# Altium footprint library Seeed_Studio_XIAO_Series_Footprints.PcbLib: 34 footprints (part 1 of 3)
Each footprint in its own frame and in the unit in brackets; x right, y up, seen from the top. Pads: shape width x height; smd on the part's side, far side on the other; paste and mask are expansions set on the pad; w line width, h text height; cw(c..) or ccw(c..) is an arc to the next point about the centre after c.
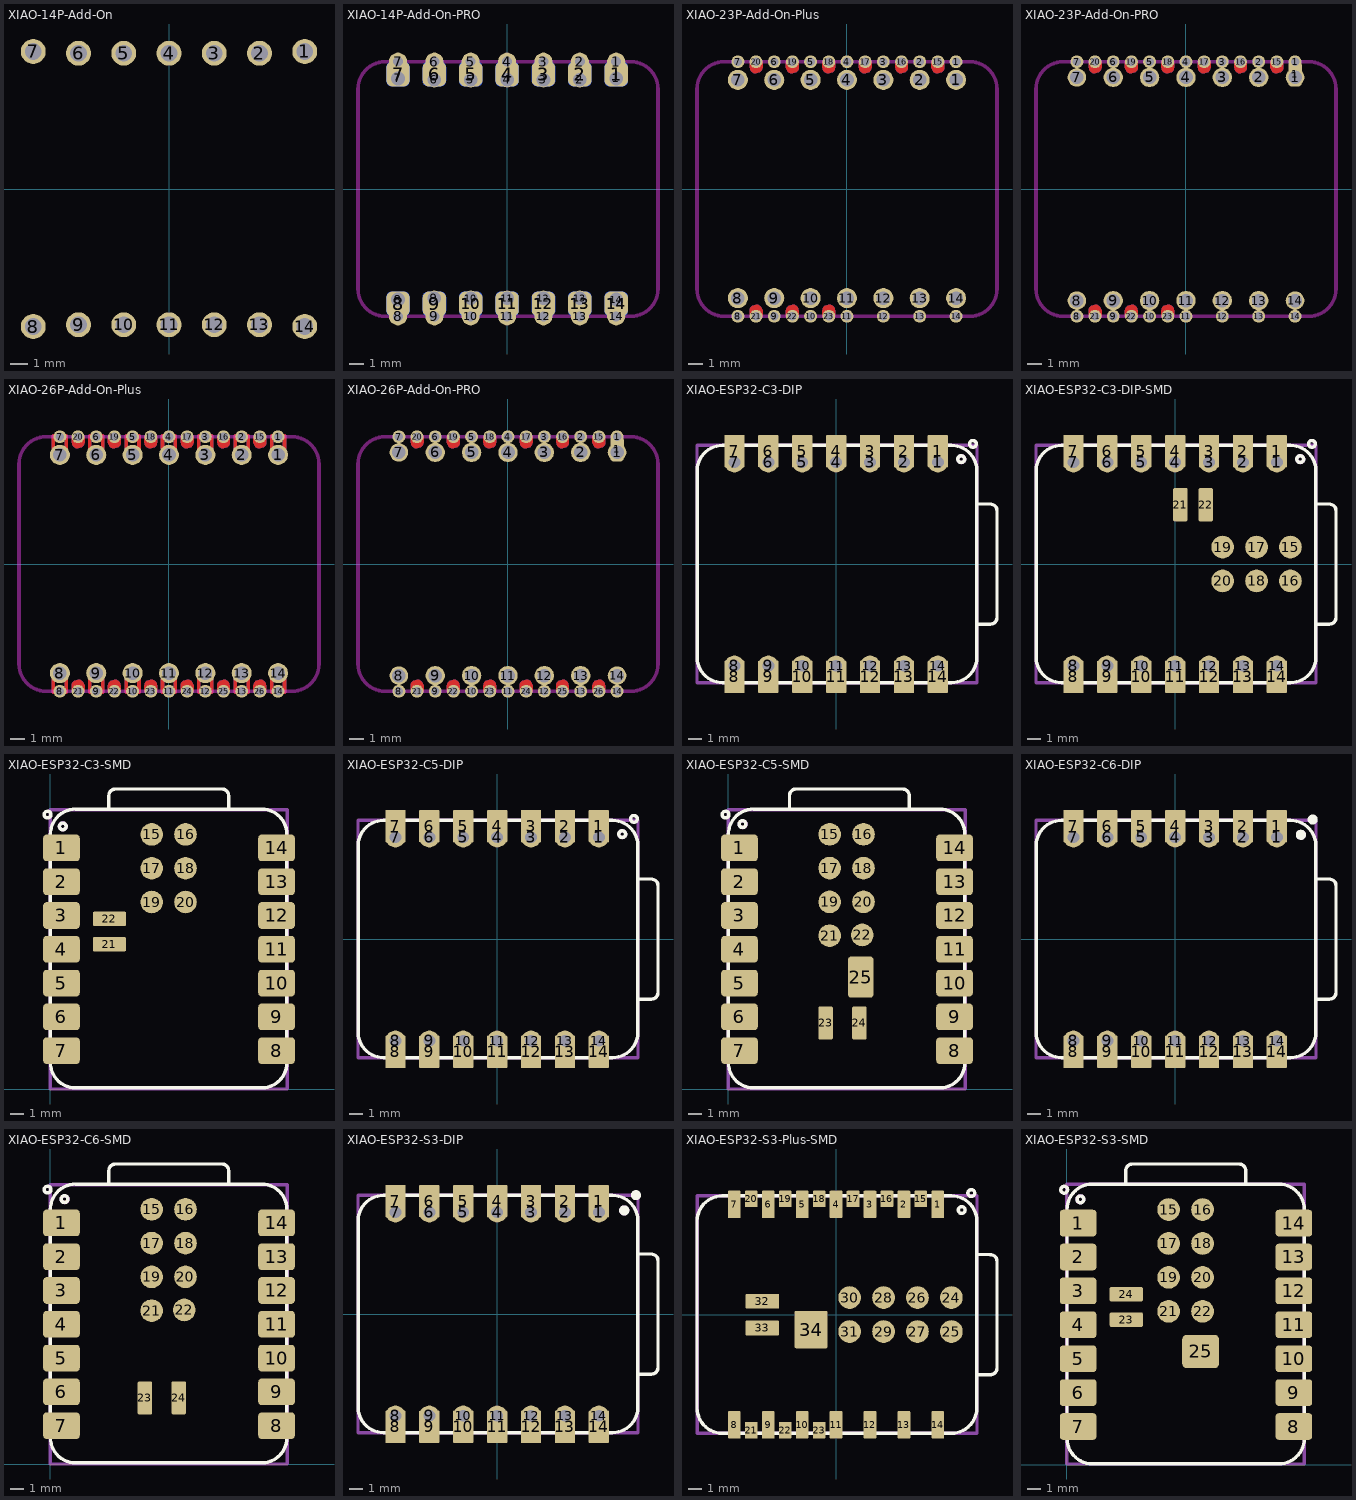
[diagram p0: the footprints below, top view; thin cyan lines are the x and y axes]

## XIAO-14P-Add-On [mm]
pads (14):
  round 1.4 hole 0.95: 1(7.62,7.72) 2(5.08,7.62) 3(2.54,7.62) 4(0,7.62) 5(-2.54,7.62) 6(-5.08,7.62) 7(-7.62,7.72) 8(-7.62,-7.72) 9(-5.08,-7.62) 10(-2.54,-7.62) 11(0,-7.62) 12(2.54,-7.62) 13(5.08,-7.62) 14(7.62,-7.72)
3D body "Seeeduino XIAO SAMD21 v4.step": height 4.5, standoff -0.01, extent -10.65,-9.077 11.95,8.823

## XIAO-14P-Add-On-PRO [mm]
pads (56):
  round 1.05 hole 0.95: 1(7.62,7.72) 2(5.08,7.62) 3(2.54,7.62) 4(0,7.62) 5(-2.54,7.62) 6(-5.08,7.62) 7(-7.62,7.72) 8(-7.62,-7.72) 9(-5.08,-7.62) 10(-2.54,-7.62) 11(0,-7.62) 12(2.54,-7.62) 13(5.08,-7.62) 14(7.62,-7.72)
  rrect50% 1.626x1.725 smd: 1(7.62,8.028) 2(5.08,8.028) 3(2.54,8.028) 4(0,8.028) 5(-2.54,8.028) 6(-5.08,8.028) 7(-7.62,8.028) 8(-7.62,-8.028) 9(-5.08,-8.028) 10(-2.54,-8.028) 11(0,-8.028) 12(2.54,-8.028) 13(5.08,-8.028) 14(7.62,-8.028)
  rrect50% 1.626x1.725 smd far side: 1(7.62,8.028) 2(5.08,8.028) 3(2.54,8.028) 4(0,8.028) 5(-2.54,8.028) 6(-5.08,8.028) 7(-7.62,8.028) 8(-7.62,-8.028) 9(-5.08,-8.028) 10(-2.54,-8.028) 11(0,-8.028) 12(2.54,-8.028) 13(5.08,-8.028) 14(7.62,-8.028)
  round 1.27 hole 0.7: 1(7.62,8.89) 2(5.08,8.89) 3(2.54,8.89) 4(0,8.89) 5(-2.54,8.89) 6(-5.08,8.89) 7(-7.62,8.89) 8(-7.62,-8.89) 9(-5.08,-8.89) 10(-2.54,-8.89) 11(0,-8.89) 12(2.54,-8.89) 13(5.08,-8.89) 14(7.62,-8.89)
Edge.Cuts:
  lines w0.254: -10.414,-6.985 ccw(c-8.509,-6.985) -8.509,-8.89 8.636,-8.89 ccw(c8.636,-6.985) 10.541,-6.985 10.541,6.985 ccw(c8.636,6.985) 8.636,8.89 -8.509,8.89 ccw(c-8.509,6.985) -10.414,6.985 -10.414,-6.985

## XIAO-23P-Add-On-Plus [mm]
pads (37):
  round 1.4 hole 0.95: 1(7.62,7.62) 2(5.08,7.62) 3(2.54,7.62) 4(0,7.62) 5(-2.54,7.62) 6(-5.08,7.62) 7(-7.62,7.62) 8(-7.62,-7.62) 9(-5.08,-7.62) 10(-2.54,-7.62) 11(0,-7.62) 12(2.54,-7.62) 13(5.08,-7.62) 14(7.62,-7.62)
  round 0.9 hole 0.6: 1(7.62,8.89) 2(5.08,8.89) 3(2.54,8.89) 4(0,8.89) 5(-2.54,8.89) 6(-5.08,8.89) 7(-7.62,8.89) 8(-7.62,-8.89) 9(-5.08,-8.89) 10(-2.54,-8.89) 11(0,-8.89) 12(2.54,-8.89) 13(5.08,-8.89) 14(7.62,-8.89) 15(6.35,8.89) 16(3.81,8.89) 17(1.27,8.89) 18(-1.27,8.89) 19(-3.81,8.89) 20(-6.35,8.89) 21(-6.35,-8.89) 22(-3.81,-8.89) 23(-1.27,-8.89)
F.Cu:
  region: -1.116,-8.098 -0.996,-8.159 -0.897,-8.258 -0.818,-8.501 -0.818,-8.941 -1.722,-8.941 -1.722,-8.505 -1.701,-8.375 -1.64,-8.255 -1.541,-8.156 -1.298,-8.077 -1.246,-8.077
  region: -3.656,-8.098 -3.536,-8.159 -3.437,-8.258 -3.358,-8.501 -3.358,-8.941 -4.262,-8.941 -4.262,-8.505 -4.241,-8.375 -4.18,-8.255 -4.081,-8.156 -3.838,-8.077 -3.786,-8.077
  region: -6.196,-8.098 -6.076,-8.159 -5.977,-8.258 -5.898,-8.501 -5.898,-8.941 -6.802,-8.941 -6.802,-8.505 -6.781,-8.375 -6.72,-8.255 -6.621,-8.156 -6.378,-8.077 -6.326,-8.077
  region: -5.898,8.505 -5.919,8.375 -5.98,8.255 -6.079,8.156 -6.322,8.077 -6.374,8.077 -6.504,8.098 -6.624,8.159 -6.723,8.258 -6.802,8.501 -6.802,8.941 -5.898,8.941
  region: -3.358,8.505 -3.379,8.375 -3.44,8.255 -3.539,8.156 -3.782,8.077 -3.834,8.077 -3.964,8.098 -4.084,8.159 -4.183,8.258 -4.262,8.501 -4.262,8.941 -3.358,8.941
  region: -0.818,8.505 -0.839,8.375 -0.9,8.255 -0.999,8.156 -1.242,8.077 -1.294,8.077 -1.424,8.098 -1.544,8.159 -1.643,8.258 -1.722,8.501 -1.722,8.941 -0.818,8.941
  region: 1.722,8.505 1.701,8.375 1.64,8.255 1.541,8.156 1.298,8.077 1.246,8.077 1.116,8.098 0.996,8.159 0.897,8.258 0.818,8.501 0.818,8.941 1.722,8.941
  region: 4.262,8.505 4.241,8.375 4.18,8.255 4.081,8.156 3.838,8.077 3.786,8.077 3.656,8.098 3.536,8.159 3.437,8.258 3.358,8.501 3.358,8.941 4.262,8.941
  region: 6.802,8.505 6.781,8.375 6.72,8.255 6.621,8.156 6.378,8.077 6.326,8.077 6.196,8.098 6.076,8.159 5.977,8.258 5.898,8.501 5.898,8.941 6.802,8.941
B.Cu:
  region: -1.116,-8.098 -0.996,-8.159 -0.897,-8.258 -0.818,-8.501 -0.818,-8.941 -1.722,-8.941 -1.722,-8.505 -1.701,-8.375 -1.64,-8.255 -1.541,-8.156 -1.298,-8.077 -1.246,-8.077
  region: -3.656,-8.098 -3.536,-8.159 -3.437,-8.258 -3.358,-8.501 -3.358,-8.941 -4.262,-8.941 -4.262,-8.505 -4.241,-8.375 -4.18,-8.255 -4.081,-8.156 -3.838,-8.077 -3.786,-8.077
  region: -6.196,-8.098 -6.076,-8.159 -5.977,-8.258 -5.898,-8.501 -5.898,-8.941 -6.802,-8.941 -6.802,-8.505 -6.781,-8.375 -6.72,-8.255 -6.621,-8.156 -6.378,-8.077 -6.326,-8.077
  region: -5.898,8.505 -5.919,8.375 -5.98,8.255 -6.079,8.156 -6.322,8.077 -6.374,8.077 -6.504,8.098 -6.624,8.159 -6.723,8.258 -6.802,8.501 -6.802,8.941 -5.898,8.941
  region: -3.358,8.505 -3.379,8.375 -3.44,8.255 -3.539,8.156 -3.782,8.077 -3.834,8.077 -3.964,8.098 -4.084,8.159 -4.183,8.258 -4.262,8.501 -4.262,8.941 -3.358,8.941
  region: -0.818,8.505 -0.839,8.375 -0.9,8.255 -0.999,8.156 -1.242,8.077 -1.294,8.077 -1.424,8.098 -1.544,8.159 -1.643,8.258 -1.722,8.501 -1.722,8.941 -0.818,8.941
  region: 1.722,8.505 1.701,8.375 1.64,8.255 1.541,8.156 1.298,8.077 1.246,8.077 1.116,8.098 0.996,8.159 0.897,8.258 0.818,8.501 0.818,8.941 1.722,8.941
  region: 4.262,8.505 4.241,8.375 4.18,8.255 4.081,8.156 3.838,8.077 3.786,8.077 3.656,8.098 3.536,8.159 3.437,8.258 3.358,8.501 3.358,8.941 4.262,8.941
  region: 6.802,8.505 6.781,8.375 6.72,8.255 6.621,8.156 6.378,8.077 6.326,8.077 6.196,8.098 6.076,8.159 5.977,8.258 5.898,8.501 5.898,8.941 6.802,8.941
F.Mask:
  region: -1.116,-8.098 -0.996,-8.159 -0.897,-8.258 -0.818,-8.501 -0.818,-8.941 -1.722,-8.941 -1.722,-8.505 -1.701,-8.375 -1.64,-8.255 -1.541,-8.156 -1.298,-8.077 -1.246,-8.077
  region: -3.656,-8.098 -3.536,-8.159 -3.437,-8.258 -3.358,-8.501 -3.358,-8.941 -4.262,-8.941 -4.262,-8.505 -4.241,-8.375 -4.18,-8.255 -4.081,-8.156 -3.838,-8.077 -3.786,-8.077
  region: -6.196,-8.098 -6.076,-8.159 -5.977,-8.258 -5.898,-8.501 -5.898,-8.941 -6.802,-8.941 -6.802,-8.505 -6.781,-8.375 -6.72,-8.255 -6.621,-8.156 -6.378,-8.077 -6.326,-8.077
  region: -5.898,8.505 -5.919,8.375 -5.98,8.255 -6.079,8.156 -6.322,8.077 -6.374,8.077 -6.504,8.098 -6.624,8.159 -6.723,8.258 -6.802,8.501 -6.802,8.941 -5.898,8.941
  region: -3.358,8.505 -3.379,8.375 -3.44,8.255 -3.539,8.156 -3.782,8.077 -3.834,8.077 -3.964,8.098 -4.084,8.159 -4.183,8.258 -4.262,8.501 -4.262,8.941 -3.358,8.941
  region: -0.818,8.505 -0.839,8.375 -0.9,8.255 -0.999,8.156 -1.242,8.077 -1.294,8.077 -1.424,8.098 -1.544,8.159 -1.643,8.258 -1.722,8.501 -1.722,8.941 -0.818,8.941
  region: 1.722,8.505 1.701,8.375 1.64,8.255 1.541,8.156 1.298,8.077 1.246,8.077 1.116,8.098 0.996,8.159 0.897,8.258 0.818,8.501 0.818,8.941 1.722,8.941
  region: 4.262,8.505 4.241,8.375 4.18,8.255 4.081,8.156 3.838,8.077 3.786,8.077 3.656,8.098 3.536,8.159 3.437,8.258 3.358,8.501 3.358,8.941 4.262,8.941
  region: 6.802,8.505 6.781,8.375 6.72,8.255 6.621,8.156 6.378,8.077 6.326,8.077 6.196,8.098 6.076,8.159 5.977,8.258 5.898,8.501 5.898,8.941 6.802,8.941
B.Mask:
  region: -1.116,-8.098 -0.996,-8.159 -0.897,-8.258 -0.818,-8.501 -0.818,-8.941 -1.722,-8.941 -1.722,-8.505 -1.701,-8.375 -1.64,-8.255 -1.541,-8.156 -1.298,-8.077 -1.246,-8.077
  region: -3.656,-8.098 -3.536,-8.159 -3.437,-8.258 -3.358,-8.501 -3.358,-8.941 -4.262,-8.941 -4.262,-8.505 -4.241,-8.375 -4.18,-8.255 -4.081,-8.156 -3.838,-8.077 -3.786,-8.077
  region: -6.196,-8.098 -6.076,-8.159 -5.977,-8.258 -5.898,-8.501 -5.898,-8.941 -6.802,-8.941 -6.802,-8.505 -6.781,-8.375 -6.72,-8.255 -6.621,-8.156 -6.378,-8.077 -6.326,-8.077
  region: -5.898,8.505 -5.919,8.375 -5.98,8.255 -6.079,8.156 -6.322,8.077 -6.374,8.077 -6.504,8.098 -6.624,8.159 -6.723,8.258 -6.802,8.501 -6.802,8.941 -5.898,8.941
  region: -3.358,8.505 -3.379,8.375 -3.44,8.255 -3.539,8.156 -3.782,8.077 -3.834,8.077 -3.964,8.098 -4.084,8.159 -4.183,8.258 -4.262,8.501 -4.262,8.941 -3.358,8.941
  region: -0.818,8.505 -0.839,8.375 -0.9,8.255 -0.999,8.156 -1.242,8.077 -1.294,8.077 -1.424,8.098 -1.544,8.159 -1.643,8.258 -1.722,8.501 -1.722,8.941 -0.818,8.941
  region: 1.722,8.505 1.701,8.375 1.64,8.255 1.541,8.156 1.298,8.077 1.246,8.077 1.116,8.098 0.996,8.159 0.897,8.258 0.818,8.501 0.818,8.941 1.722,8.941
  region: 4.262,8.505 4.241,8.375 4.18,8.255 4.081,8.156 3.838,8.077 3.786,8.077 3.656,8.098 3.536,8.159 3.437,8.258 3.358,8.501 3.358,8.941 4.262,8.941
  region: 6.802,8.505 6.781,8.375 6.72,8.255 6.621,8.156 6.378,8.077 6.326,8.077 6.196,8.098 6.076,8.159 5.977,8.258 5.898,8.501 5.898,8.941 6.802,8.941
Edge.Cuts:
  lines w0.254: -10.475,-6.985 ccw(c-8.57,-6.985) -8.57,-8.89 8.575,-8.89 ccw(c8.575,-6.985) 10.48,-6.985 10.48,6.985 ccw(c8.575,6.985) 8.575,8.89 -8.57,8.89 ccw(c-8.57,6.985) -10.475,6.985 -10.475,-6.985

## XIAO-23P-Add-On-PRO [mm]
pads (38):
  round 1.3 hole 0.95: 1(7.62,7.795) 7(-7.62,7.795) 8(-7.62,-7.795) 14(7.62,-7.795)
  rrect50% 0.95x1.725 smd: 1(7.62,8.028)
  round 0.9 hole 0.6: 1(7.62,8.89) 2(5.08,8.89) 3(2.54,8.89) 4(0,8.89) 5(-2.54,8.89) 6(-5.08,8.89) 7(-7.62,8.89) 8(-7.62,-8.89) 9(-5.08,-8.89) 10(-2.54,-8.89) 11(0,-8.89) 12(2.54,-8.89) 13(5.08,-8.89) 14(7.62,-8.89) 15(6.35,8.89) 16(3.81,8.89) 17(1.27,8.89) 18(-1.27,8.89) 19(-3.81,8.89) 20(-6.35,8.89) 21(-6.35,-8.89) 22(-3.81,-8.89) 23(-1.27,-8.89)
  round 1.35 hole 0.95: 2(5.08,7.795) 3(2.54,7.795) 4(0,7.795) 5(-2.54,7.795) 6(-5.08,7.795) 9(-5.08,-7.795) 10(-2.54,-7.795) 11(0,-7.795) 12(2.54,-7.795) 13(5.08,-7.795)
F.Cu:
  region: -1.116,-8.098 -0.996,-8.159 -0.897,-8.258 -0.818,-8.501 -0.818,-8.941 -1.722,-8.941 -1.722,-8.505 -1.701,-8.375 -1.64,-8.255 -1.541,-8.156 -1.298,-8.077 -1.246,-8.077
  region: -3.656,-8.098 -3.536,-8.159 -3.437,-8.258 -3.358,-8.501 -3.358,-8.941 -4.262,-8.941 -4.262,-8.505 -4.241,-8.375 -4.18,-8.255 -4.081,-8.156 -3.838,-8.077 -3.786,-8.077
  region: -6.196,-8.098 -6.076,-8.159 -5.977,-8.258 -5.898,-8.501 -5.898,-8.941 -6.802,-8.941 -6.802,-8.505 -6.781,-8.375 -6.72,-8.255 -6.621,-8.156 -6.378,-8.077 -6.326,-8.077
  region: -5.898,8.505 -5.919,8.375 -5.98,8.255 -6.079,8.156 -6.322,8.077 -6.374,8.077 -6.504,8.098 -6.624,8.159 -6.723,8.258 -6.802,8.501 -6.802,8.941 -5.898,8.941
  region: -3.358,8.505 -3.379,8.375 -3.44,8.255 -3.539,8.156 -3.782,8.077 -3.834,8.077 -3.964,8.098 -4.084,8.159 -4.183,8.258 -4.262,8.501 -4.262,8.941 -3.358,8.941
  region: -0.818,8.505 -0.839,8.375 -0.9,8.255 -0.999,8.156 -1.242,8.077 -1.294,8.077 -1.424,8.098 -1.544,8.159 -1.643,8.258 -1.722,8.501 -1.722,8.941 -0.818,8.941
  region: 1.722,8.505 1.701,8.375 1.64,8.255 1.541,8.156 1.298,8.077 1.246,8.077 1.116,8.098 0.996,8.159 0.897,8.258 0.818,8.501 0.818,8.941 1.722,8.941
  region: 4.262,8.505 4.241,8.375 4.18,8.255 4.081,8.156 3.838,8.077 3.786,8.077 3.656,8.098 3.536,8.159 3.437,8.258 3.358,8.501 3.358,8.941 4.262,8.941
  region: 6.802,8.505 6.781,8.375 6.72,8.255 6.621,8.156 6.378,8.077 6.326,8.077 6.196,8.098 6.076,8.159 5.977,8.258 5.898,8.501 5.898,8.941 6.802,8.941
B.Cu:
  region: -1.116,-8.098 -0.996,-8.159 -0.897,-8.258 -0.818,-8.501 -0.818,-8.941 -1.722,-8.941 -1.722,-8.505 -1.701,-8.375 -1.64,-8.255 -1.541,-8.156 -1.298,-8.077 -1.246,-8.077
  region: -3.656,-8.098 -3.536,-8.159 -3.437,-8.258 -3.358,-8.501 -3.358,-8.941 -4.262,-8.941 -4.262,-8.505 -4.241,-8.375 -4.18,-8.255 -4.081,-8.156 -3.838,-8.077 -3.786,-8.077
  region: -6.196,-8.098 -6.076,-8.159 -5.977,-8.258 -5.898,-8.501 -5.898,-8.941 -6.802,-8.941 -6.802,-8.505 -6.781,-8.375 -6.72,-8.255 -6.621,-8.156 -6.378,-8.077 -6.326,-8.077
  region: -5.898,8.505 -5.919,8.375 -5.98,8.255 -6.079,8.156 -6.322,8.077 -6.374,8.077 -6.504,8.098 -6.624,8.159 -6.723,8.258 -6.802,8.501 -6.802,8.941 -5.898,8.941
  region: -3.358,8.505 -3.379,8.375 -3.44,8.255 -3.539,8.156 -3.782,8.077 -3.834,8.077 -3.964,8.098 -4.084,8.159 -4.183,8.258 -4.262,8.501 -4.262,8.941 -3.358,8.941
  region: -0.818,8.505 -0.839,8.375 -0.9,8.255 -0.999,8.156 -1.242,8.077 -1.294,8.077 -1.424,8.098 -1.544,8.159 -1.643,8.258 -1.722,8.501 -1.722,8.941 -0.818,8.941
  region: 1.722,8.505 1.701,8.375 1.64,8.255 1.541,8.156 1.298,8.077 1.246,8.077 1.116,8.098 0.996,8.159 0.897,8.258 0.818,8.501 0.818,8.941 1.722,8.941
  region: 4.262,8.505 4.241,8.375 4.18,8.255 4.081,8.156 3.838,8.077 3.786,8.077 3.656,8.098 3.536,8.159 3.437,8.258 3.358,8.501 3.358,8.941 4.262,8.941
  region: 6.802,8.505 6.781,8.375 6.72,8.255 6.621,8.156 6.378,8.077 6.326,8.077 6.196,8.098 6.076,8.159 5.977,8.258 5.898,8.501 5.898,8.941 6.802,8.941
F.Mask:
  region: -1.116,-8.098 -0.996,-8.159 -0.897,-8.258 -0.818,-8.501 -0.818,-8.941 -1.722,-8.941 -1.722,-8.505 -1.701,-8.375 -1.64,-8.255 -1.541,-8.156 -1.298,-8.077 -1.246,-8.077
  region: -3.656,-8.098 -3.536,-8.159 -3.437,-8.258 -3.358,-8.501 -3.358,-8.941 -4.262,-8.941 -4.262,-8.505 -4.241,-8.375 -4.18,-8.255 -4.081,-8.156 -3.838,-8.077 -3.786,-8.077
  region: -6.196,-8.098 -6.076,-8.159 -5.977,-8.258 -5.898,-8.501 -5.898,-8.941 -6.802,-8.941 -6.802,-8.505 -6.781,-8.375 -6.72,-8.255 -6.621,-8.156 -6.378,-8.077 -6.326,-8.077
  region: -5.898,8.505 -5.919,8.375 -5.98,8.255 -6.079,8.156 -6.322,8.077 -6.374,8.077 -6.504,8.098 -6.624,8.159 -6.723,8.258 -6.802,8.501 -6.802,8.941 -5.898,8.941
  region: -3.358,8.505 -3.379,8.375 -3.44,8.255 -3.539,8.156 -3.782,8.077 -3.834,8.077 -3.964,8.098 -4.084,8.159 -4.183,8.258 -4.262,8.501 -4.262,8.941 -3.358,8.941
  region: -0.818,8.505 -0.839,8.375 -0.9,8.255 -0.999,8.156 -1.242,8.077 -1.294,8.077 -1.424,8.098 -1.544,8.159 -1.643,8.258 -1.722,8.501 -1.722,8.941 -0.818,8.941
  region: 1.722,8.505 1.701,8.375 1.64,8.255 1.541,8.156 1.298,8.077 1.246,8.077 1.116,8.098 0.996,8.159 0.897,8.258 0.818,8.501 0.818,8.941 1.722,8.941
  region: 4.262,8.505 4.241,8.375 4.18,8.255 4.081,8.156 3.838,8.077 3.786,8.077 3.656,8.098 3.536,8.159 3.437,8.258 3.358,8.501 3.358,8.941 4.262,8.941
  region: 6.802,8.505 6.781,8.375 6.72,8.255 6.621,8.156 6.378,8.077 6.326,8.077 6.196,8.098 6.076,8.159 5.977,8.258 5.898,8.501 5.898,8.941 6.802,8.941
B.Mask:
  region: -1.116,-8.098 -0.996,-8.159 -0.897,-8.258 -0.818,-8.501 -0.818,-8.941 -1.722,-8.941 -1.722,-8.505 -1.701,-8.375 -1.64,-8.255 -1.541,-8.156 -1.298,-8.077 -1.246,-8.077
  region: -3.656,-8.098 -3.536,-8.159 -3.437,-8.258 -3.358,-8.501 -3.358,-8.941 -4.262,-8.941 -4.262,-8.505 -4.241,-8.375 -4.18,-8.255 -4.081,-8.156 -3.838,-8.077 -3.786,-8.077
  region: -6.196,-8.098 -6.076,-8.159 -5.977,-8.258 -5.898,-8.501 -5.898,-8.941 -6.802,-8.941 -6.802,-8.505 -6.781,-8.375 -6.72,-8.255 -6.621,-8.156 -6.378,-8.077 -6.326,-8.077
  region: -5.898,8.505 -5.919,8.375 -5.98,8.255 -6.079,8.156 -6.322,8.077 -6.374,8.077 -6.504,8.098 -6.624,8.159 -6.723,8.258 -6.802,8.501 -6.802,8.941 -5.898,8.941
  region: -3.358,8.505 -3.379,8.375 -3.44,8.255 -3.539,8.156 -3.782,8.077 -3.834,8.077 -3.964,8.098 -4.084,8.159 -4.183,8.258 -4.262,8.501 -4.262,8.941 -3.358,8.941
  region: -0.818,8.505 -0.839,8.375 -0.9,8.255 -0.999,8.156 -1.242,8.077 -1.294,8.077 -1.424,8.098 -1.544,8.159 -1.643,8.258 -1.722,8.501 -1.722,8.941 -0.818,8.941
  region: 1.722,8.505 1.701,8.375 1.64,8.255 1.541,8.156 1.298,8.077 1.246,8.077 1.116,8.098 0.996,8.159 0.897,8.258 0.818,8.501 0.818,8.941 1.722,8.941
  region: 4.262,8.505 4.241,8.375 4.18,8.255 4.081,8.156 3.838,8.077 3.786,8.077 3.656,8.098 3.536,8.159 3.437,8.258 3.358,8.501 3.358,8.941 4.262,8.941
  region: 6.802,8.505 6.781,8.375 6.72,8.255 6.621,8.156 6.378,8.077 6.326,8.077 6.196,8.098 6.076,8.159 5.977,8.258 5.898,8.501 5.898,8.941 6.802,8.941
Edge.Cuts:
  lines w0.254: -10.475,-6.985 ccw(c-8.57,-6.985) -8.57,-8.89 8.575,-8.89 ccw(c8.575,-6.985) 10.48,-6.985 10.48,6.985 ccw(c8.575,6.985) 8.575,8.89 -8.57,8.89 ccw(c-8.57,6.985) -10.475,6.985 -10.475,-6.985

## XIAO-26P-Add-On-Plus [mm]
pads (40):
  round 1.4 hole 0.95: 1(7.62,7.62) 2(5.08,7.62) 3(2.54,7.62) 4(0,7.62) 5(-2.54,7.62) 6(-5.08,7.62) 7(-7.62,7.62) 8(-7.62,-7.62) 9(-5.08,-7.62) 10(-2.54,-7.62) 11(0,-7.62) 12(2.54,-7.62) 13(5.08,-7.62) 14(7.62,-7.62)
  round 0.9 hole 0.6: 1(7.62,8.89) 2(5.08,8.89) 3(2.54,8.89) 4(0,8.89) 5(-2.54,8.89) 6(-5.08,8.89) 7(-7.62,8.89) 8(-7.62,-8.89) 9(-5.08,-8.89) 10(-2.54,-8.89) 11(0,-8.89) 12(2.54,-8.89) 13(5.08,-8.89) 14(7.62,-8.89) 15(6.35,8.89) 16(3.81,8.89) 17(1.27,8.89) 18(-1.27,8.89) 19(-3.81,8.89) 20(-6.35,8.89) 21(-6.35,-8.89) 22(-3.81,-8.89) 23(-1.27,-8.89) 24(1.27,-8.89) 25(3.81,-8.89) 26(6.35,-8.89)
F.Cu:
  region: 6.802,8.505 6.781,8.375 6.72,8.255 6.621,8.156 6.378,8.077 6.326,8.077 6.196,8.098 6.076,8.159 5.977,8.258 5.898,8.501 5.898,8.941 6.802,8.941
  region: 6.504,-8.098 6.624,-8.159 6.723,-8.258 6.802,-8.501 6.802,-8.941 5.898,-8.941 5.898,-8.505 5.919,-8.375 5.98,-8.255 6.079,-8.156 6.322,-8.077 6.374,-8.077
  region: 4.262,8.505 4.241,8.375 4.18,8.255 4.081,8.156 3.838,8.077 3.786,8.077 3.656,8.098 3.536,8.159 3.437,8.258 3.358,8.501 3.358,8.941 4.262,8.941
  region: 3.964,-8.098 4.084,-8.159 4.183,-8.258 4.262,-8.501 4.262,-8.941 3.358,-8.941 3.358,-8.505 3.379,-8.375 3.44,-8.255 3.539,-8.156 3.782,-8.077 3.834,-8.077
  region: 1.722,8.505 1.701,8.375 1.64,8.255 1.541,8.156 1.298,8.077 1.246,8.077 1.116,8.098 0.996,8.159 0.897,8.258 0.818,8.501 0.818,8.941 1.722,8.941
  region: 1.424,-8.098 1.544,-8.159 1.643,-8.258 1.722,-8.501 1.722,-8.941 0.818,-8.941 0.818,-8.505 0.839,-8.375 0.9,-8.255 0.999,-8.156 1.242,-8.077 1.294,-8.077
  region: -0.818,8.505 -0.839,8.375 -0.9,8.255 -0.999,8.156 -1.242,8.077 -1.294,8.077 -1.424,8.098 -1.544,8.159 -1.643,8.258 -1.722,8.501 -1.722,8.941 -0.818,8.941
  region: -1.116,-8.098 -0.996,-8.159 -0.897,-8.258 -0.818,-8.501 -0.818,-8.941 -1.722,-8.941 -1.722,-8.505 -1.701,-8.375 -1.64,-8.255 -1.541,-8.156 -1.298,-8.077 -1.246,-8.077
  region: -3.358,8.505 -3.379,8.375 -3.44,8.255 -3.539,8.156 -3.782,8.077 -3.834,8.077 -3.964,8.098 -4.084,8.159 -4.183,8.258 -4.262,8.501 -4.262,8.941 -3.358,8.941
  region: -3.656,-8.098 -3.536,-8.159 -3.437,-8.258 -3.358,-8.501 -3.358,-8.941 -4.262,-8.941 -4.262,-8.505 -4.241,-8.375 -4.18,-8.255 -4.081,-8.156 -3.838,-8.077 -3.786,-8.077
  region: -5.898,8.505 -5.919,8.375 -5.98,8.255 -6.079,8.156 -6.322,8.077 -6.374,8.077 -6.504,8.098 -6.624,8.159 -6.723,8.258 -6.802,8.501 -6.802,8.941 -5.898,8.941
  region: -6.196,-8.098 -6.076,-8.159 -5.977,-8.258 -5.898,-8.501 -5.898,-8.941 -6.802,-8.941 -6.802,-8.505 -6.781,-8.375 -6.72,-8.255 -6.621,-8.156 -6.378,-8.077 -6.326,-8.077
  lines w0.254: -8.072,-8.941 -7.168,-8.941 -7.168,-8.077 -8.072,-8.077 -8.072,-8.941 ; -8.072,8.077 -7.168,8.077 -7.168,8.941 -8.072,8.941 -8.072,8.077 ; -5.532,-8.941 -4.628,-8.941 -4.628,-8.077 -5.532,-8.077 -5.532,-8.941 ; -5.532,8.077 -4.628,8.077 -4.628,8.941 -5.532,8.941 -5.532,8.077 ; -2.992,-8.941 -2.088,-8.941 -2.088,-8.077 -2.992,-8.077 -2.992,-8.941 ; -2.992,8.077 -2.088,8.077 -2.088,8.941 -2.992,8.941 -2.992,8.077 ; -0.452,-8.941 0.452,-8.941 0.452,-8.077 -0.452,-8.077 -0.452,-8.941 ; -0.452,8.077 0.452,8.077 0.452,8.941 -0.452,8.941 -0.452,8.077 ; 2.088,-8.941 2.992,-8.941 2.992,-8.077 2.088,-8.077 2.088,-8.941 ; 2.088,8.077 2.992,8.077 2.992,8.941 2.088,8.941 2.088,8.077 ; 4.628,-8.941 5.532,-8.941 5.532,-8.077 4.628,-8.077 4.628,-8.941 ; 4.628,8.077 5.532,8.077 5.532,8.941 4.628,8.941 4.628,8.077 ; 7.168,-8.941 8.072,-8.941 8.072,-8.077 7.168,-8.077 7.168,-8.941 ; 7.168,8.077 8.072,8.077 8.072,8.941 7.168,8.941 7.168,8.077
B.Cu:
  region: 6.802,8.505 6.781,8.375 6.72,8.255 6.621,8.156 6.378,8.077 6.326,8.077 6.196,8.098 6.076,8.159 5.977,8.258 5.898,8.501 5.898,8.941 6.802,8.941
  region: 6.504,-8.098 6.624,-8.159 6.723,-8.258 6.802,-8.501 6.802,-8.941 5.898,-8.941 5.898,-8.505 5.919,-8.375 5.98,-8.255 6.079,-8.156 6.322,-8.077 6.374,-8.077
  region: 4.262,8.505 4.241,8.375 4.18,8.255 4.081,8.156 3.838,8.077 3.786,8.077 3.656,8.098 3.536,8.159 3.437,8.258 3.358,8.501 3.358,8.941 4.262,8.941
  region: 3.964,-8.098 4.084,-8.159 4.183,-8.258 4.262,-8.501 4.262,-8.941 3.358,-8.941 3.358,-8.505 3.379,-8.375 3.44,-8.255 3.539,-8.156 3.782,-8.077 3.834,-8.077
  region: 1.722,8.505 1.701,8.375 1.64,8.255 1.541,8.156 1.298,8.077 1.246,8.077 1.116,8.098 0.996,8.159 0.897,8.258 0.818,8.501 0.818,8.941 1.722,8.941
  region: 1.424,-8.098 1.544,-8.159 1.643,-8.258 1.722,-8.501 1.722,-8.941 0.818,-8.941 0.818,-8.505 0.839,-8.375 0.9,-8.255 0.999,-8.156 1.242,-8.077 1.294,-8.077
  region: -0.818,8.505 -0.839,8.375 -0.9,8.255 -0.999,8.156 -1.242,8.077 -1.294,8.077 -1.424,8.098 -1.544,8.159 -1.643,8.258 -1.722,8.501 -1.722,8.941 -0.818,8.941
  region: -1.116,-8.098 -0.996,-8.159 -0.897,-8.258 -0.818,-8.501 -0.818,-8.941 -1.722,-8.941 -1.722,-8.505 -1.701,-8.375 -1.64,-8.255 -1.541,-8.156 -1.298,-8.077 -1.246,-8.077
  region: -3.358,8.505 -3.379,8.375 -3.44,8.255 -3.539,8.156 -3.782,8.077 -3.834,8.077 -3.964,8.098 -4.084,8.159 -4.183,8.258 -4.262,8.501 -4.262,8.941 -3.358,8.941
  region: -3.656,-8.098 -3.536,-8.159 -3.437,-8.258 -3.358,-8.501 -3.358,-8.941 -4.262,-8.941 -4.262,-8.505 -4.241,-8.375 -4.18,-8.255 -4.081,-8.156 -3.838,-8.077 -3.786,-8.077
  region: -5.898,8.505 -5.919,8.375 -5.98,8.255 -6.079,8.156 -6.322,8.077 -6.374,8.077 -6.504,8.098 -6.624,8.159 -6.723,8.258 -6.802,8.501 -6.802,8.941 -5.898,8.941
  region: -6.196,-8.098 -6.076,-8.159 -5.977,-8.258 -5.898,-8.501 -5.898,-8.941 -6.802,-8.941 -6.802,-8.505 -6.781,-8.375 -6.72,-8.255 -6.621,-8.156 -6.378,-8.077 -6.326,-8.077
  lines w0.254: -8.072,-8.941 -7.168,-8.941 -7.168,-8.077 -8.072,-8.077 -8.072,-8.941 ; -8.072,8.077 -7.168,8.077 -7.168,8.941 -8.072,8.941 -8.072,8.077 ; -5.532,-8.941 -4.628,-8.941 -4.628,-8.077 -5.532,-8.077 -5.532,-8.941 ; -5.532,8.077 -4.628,8.077 -4.628,8.941 -5.532,8.941 -5.532,8.077 ; -2.992,-8.941 -2.088,-8.941 -2.088,-8.077 -2.992,-8.077 -2.992,-8.941 ; -2.992,8.077 -2.088,8.077 -2.088,8.941 -2.992,8.941 -2.992,8.077 ; -0.452,-8.941 0.452,-8.941 0.452,-8.077 -0.452,-8.077 -0.452,-8.941 ; -0.452,8.077 0.452,8.077 0.452,8.941 -0.452,8.941 -0.452,8.077 ; 2.088,-8.941 2.992,-8.941 2.992,-8.077 2.088,-8.077 2.088,-8.941 ; 2.088,8.077 2.992,8.077 2.992,8.941 2.088,8.941 2.088,8.077 ; 4.628,-8.941 5.532,-8.941 5.532,-8.077 4.628,-8.077 4.628,-8.941 ; 4.628,8.077 5.532,8.077 5.532,8.941 4.628,8.941 4.628,8.077 ; 7.168,-8.941 8.072,-8.941 8.072,-8.077 7.168,-8.077 7.168,-8.941 ; 7.168,8.077 8.072,8.077 8.072,8.941 7.168,8.941 7.168,8.077
F.Mask:
  drawing of 68 lines, arcs and shapes, not listed
B.Mask:
  drawing of 68 lines, arcs and shapes, not listed
Edge.Cuts:
  lines w0.254: -10.475,-6.985 ccw(c-8.57,-6.985) -8.57,-8.89 8.575,-8.89 ccw(c8.575,-6.985) 10.48,-6.985 10.48,6.985 ccw(c8.575,6.985) 8.575,8.89 -8.57,8.89 ccw(c-8.57,6.985) -10.475,6.985 -10.475,-6.985

## XIAO-26P-Add-On-PRO [mm]
pads (41):
  round 1.3 hole 0.95: 1(7.62,7.795) 7(-7.62,7.795) 8(-7.62,-7.795) 14(7.62,-7.795)
  rrect50% 0.95x1.725 smd: 1(7.62,8.028)
  round 0.9 hole 0.6: 1(7.62,8.89) 2(5.08,8.89) 3(2.54,8.89) 4(0,8.89) 5(-2.54,8.89) 6(-5.08,8.89) 7(-7.62,8.89) 8(-7.62,-8.89) 9(-5.08,-8.89) 10(-2.54,-8.89) 11(0,-8.89) 12(2.54,-8.89) 13(5.08,-8.89) 14(7.62,-8.89) 15(6.35,8.89) 16(3.81,8.89) 17(1.27,8.89) 18(-1.27,8.89) 19(-3.81,8.89) 20(-6.35,8.89) 21(-6.35,-8.89) 22(-3.81,-8.89) 23(-1.27,-8.89) 24(1.27,-8.89) 25(3.81,-8.89) 26(6.35,-8.89)
  round 1.35 hole 0.95: 2(5.08,7.795) 3(2.54,7.795) 4(0,7.795) 5(-2.54,7.795) 6(-5.08,7.795) 9(-5.08,-7.795) 10(-2.54,-7.795) 11(0,-7.795) 12(2.54,-7.795) 13(5.08,-7.795)
F.Cu:
  region: 6.802,8.505 6.781,8.375 6.72,8.255 6.621,8.156 6.378,8.077 6.326,8.077 6.196,8.098 6.076,8.159 5.977,8.258 5.898,8.501 5.898,8.941 6.802,8.941
  region: 4.262,8.505 4.241,8.375 4.18,8.255 4.081,8.156 3.838,8.077 3.786,8.077 3.656,8.098 3.536,8.159 3.437,8.258 3.358,8.501 3.358,8.941 4.262,8.941
  region: 1.722,8.505 1.701,8.375 1.64,8.255 1.541,8.156 1.298,8.077 1.246,8.077 1.116,8.098 0.996,8.159 0.897,8.258 0.818,8.501 0.818,8.941 1.722,8.941
  region: -0.818,8.505 -0.839,8.375 -0.9,8.255 -0.999,8.156 -1.242,8.077 -1.294,8.077 -1.424,8.098 -1.544,8.159 -1.643,8.258 -1.722,8.501 -1.722,8.941 -0.818,8.941
  region: -3.358,8.505 -3.379,8.375 -3.44,8.255 -3.539,8.156 -3.782,8.077 -3.834,8.077 -3.964,8.098 -4.084,8.159 -4.183,8.258 -4.262,8.501 -4.262,8.941 -3.358,8.941
  region: -5.898,8.505 -5.919,8.375 -5.98,8.255 -6.079,8.156 -6.322,8.077 -6.374,8.077 -6.504,8.098 -6.624,8.159 -6.723,8.258 -6.802,8.501 -6.802,8.941 -5.898,8.941
  region: -6.196,-8.098 -6.076,-8.159 -5.977,-8.258 -5.898,-8.501 -5.898,-8.941 -6.802,-8.941 -6.802,-8.505 -6.781,-8.375 -6.72,-8.255 -6.621,-8.156 -6.378,-8.077 -6.326,-8.077
  region: -3.656,-8.098 -3.536,-8.159 -3.437,-8.258 -3.358,-8.501 -3.358,-8.941 -4.262,-8.941 -4.262,-8.505 -4.241,-8.375 -4.18,-8.255 -4.081,-8.156 -3.838,-8.077 -3.786,-8.077
  region: -1.116,-8.098 -0.996,-8.159 -0.897,-8.258 -0.818,-8.501 -0.818,-8.941 -1.722,-8.941 -1.722,-8.505 -1.701,-8.375 -1.64,-8.255 -1.541,-8.156 -1.298,-8.077 -1.246,-8.077
  region: 1.424,-8.098 1.544,-8.159 1.643,-8.258 1.722,-8.501 1.722,-8.941 0.818,-8.941 0.818,-8.505 0.839,-8.375 0.9,-8.255 0.999,-8.156 1.242,-8.077 1.294,-8.077
  region: 3.964,-8.098 4.084,-8.159 4.183,-8.258 4.262,-8.501 4.262,-8.941 3.358,-8.941 3.358,-8.505 3.379,-8.375 3.44,-8.255 3.539,-8.156 3.782,-8.077 3.834,-8.077
  region: 6.504,-8.098 6.624,-8.159 6.723,-8.258 6.802,-8.501 6.802,-8.941 5.898,-8.941 5.898,-8.505 5.919,-8.375 5.98,-8.255 6.079,-8.156 6.322,-8.077 6.374,-8.077
B.Cu:
  region: 6.802,8.505 6.781,8.375 6.72,8.255 6.621,8.156 6.378,8.077 6.326,8.077 6.196,8.098 6.076,8.159 5.977,8.258 5.898,8.501 5.898,8.941 6.802,8.941
  region: 4.262,8.505 4.241,8.375 4.18,8.255 4.081,8.156 3.838,8.077 3.786,8.077 3.656,8.098 3.536,8.159 3.437,8.258 3.358,8.501 3.358,8.941 4.262,8.941
  region: 1.722,8.505 1.701,8.375 1.64,8.255 1.541,8.156 1.298,8.077 1.246,8.077 1.116,8.098 0.996,8.159 0.897,8.258 0.818,8.501 0.818,8.941 1.722,8.941
  region: -0.818,8.505 -0.839,8.375 -0.9,8.255 -0.999,8.156 -1.242,8.077 -1.294,8.077 -1.424,8.098 -1.544,8.159 -1.643,8.258 -1.722,8.501 -1.722,8.941 -0.818,8.941
  region: -3.358,8.505 -3.379,8.375 -3.44,8.255 -3.539,8.156 -3.782,8.077 -3.834,8.077 -3.964,8.098 -4.084,8.159 -4.183,8.258 -4.262,8.501 -4.262,8.941 -3.358,8.941
  region: -5.898,8.505 -5.919,8.375 -5.98,8.255 -6.079,8.156 -6.322,8.077 -6.374,8.077 -6.504,8.098 -6.624,8.159 -6.723,8.258 -6.802,8.501 -6.802,8.941 -5.898,8.941
  region: -6.196,-8.098 -6.076,-8.159 -5.977,-8.258 -5.898,-8.501 -5.898,-8.941 -6.802,-8.941 -6.802,-8.505 -6.781,-8.375 -6.72,-8.255 -6.621,-8.156 -6.378,-8.077 -6.326,-8.077
  region: -3.656,-8.098 -3.536,-8.159 -3.437,-8.258 -3.358,-8.501 -3.358,-8.941 -4.262,-8.941 -4.262,-8.505 -4.241,-8.375 -4.18,-8.255 -4.081,-8.156 -3.838,-8.077 -3.786,-8.077
  region: -1.116,-8.098 -0.996,-8.159 -0.897,-8.258 -0.818,-8.501 -0.818,-8.941 -1.722,-8.941 -1.722,-8.505 -1.701,-8.375 -1.64,-8.255 -1.541,-8.156 -1.298,-8.077 -1.246,-8.077
  region: 1.424,-8.098 1.544,-8.159 1.643,-8.258 1.722,-8.501 1.722,-8.941 0.818,-8.941 0.818,-8.505 0.839,-8.375 0.9,-8.255 0.999,-8.156 1.242,-8.077 1.294,-8.077
  region: 3.964,-8.098 4.084,-8.159 4.183,-8.258 4.262,-8.501 4.262,-8.941 3.358,-8.941 3.358,-8.505 3.379,-8.375 3.44,-8.255 3.539,-8.156 3.782,-8.077 3.834,-8.077
  region: 6.504,-8.098 6.624,-8.159 6.723,-8.258 6.802,-8.501 6.802,-8.941 5.898,-8.941 5.898,-8.505 5.919,-8.375 5.98,-8.255 6.079,-8.156 6.322,-8.077 6.374,-8.077
F.Mask:
  region: 6.802,8.505 6.781,8.375 6.72,8.255 6.621,8.156 6.378,8.077 6.326,8.077 6.196,8.098 6.076,8.159 5.977,8.258 5.898,8.501 5.898,8.941 6.802,8.941
  region: 4.262,8.505 4.241,8.375 4.18,8.255 4.081,8.156 3.838,8.077 3.786,8.077 3.656,8.098 3.536,8.159 3.437,8.258 3.358,8.501 3.358,8.941 4.262,8.941
  region: 1.722,8.505 1.701,8.375 1.64,8.255 1.541,8.156 1.298,8.077 1.246,8.077 1.116,8.098 0.996,8.159 0.897,8.258 0.818,8.501 0.818,8.941 1.722,8.941
  region: -0.818,8.505 -0.839,8.375 -0.9,8.255 -0.999,8.156 -1.242,8.077 -1.294,8.077 -1.424,8.098 -1.544,8.159 -1.643,8.258 -1.722,8.501 -1.722,8.941 -0.818,8.941
  region: -3.358,8.505 -3.379,8.375 -3.44,8.255 -3.539,8.156 -3.782,8.077 -3.834,8.077 -3.964,8.098 -4.084,8.159 -4.183,8.258 -4.262,8.501 -4.262,8.941 -3.358,8.941
  region: -5.898,8.505 -5.919,8.375 -5.98,8.255 -6.079,8.156 -6.322,8.077 -6.374,8.077 -6.504,8.098 -6.624,8.159 -6.723,8.258 -6.802,8.501 -6.802,8.941 -5.898,8.941
  region: -6.196,-8.098 -6.076,-8.159 -5.977,-8.258 -5.898,-8.501 -5.898,-8.941 -6.802,-8.941 -6.802,-8.505 -6.781,-8.375 -6.72,-8.255 -6.621,-8.156 -6.378,-8.077 -6.326,-8.077
  region: -3.656,-8.098 -3.536,-8.159 -3.437,-8.258 -3.358,-8.501 -3.358,-8.941 -4.262,-8.941 -4.262,-8.505 -4.241,-8.375 -4.18,-8.255 -4.081,-8.156 -3.838,-8.077 -3.786,-8.077
  region: -1.116,-8.098 -0.996,-8.159 -0.897,-8.258 -0.818,-8.501 -0.818,-8.941 -1.722,-8.941 -1.722,-8.505 -1.701,-8.375 -1.64,-8.255 -1.541,-8.156 -1.298,-8.077 -1.246,-8.077
  region: 1.424,-8.098 1.544,-8.159 1.643,-8.258 1.722,-8.501 1.722,-8.941 0.818,-8.941 0.818,-8.505 0.839,-8.375 0.9,-8.255 0.999,-8.156 1.242,-8.077 1.294,-8.077
  region: 3.964,-8.098 4.084,-8.159 4.183,-8.258 4.262,-8.501 4.262,-8.941 3.358,-8.941 3.358,-8.505 3.379,-8.375 3.44,-8.255 3.539,-8.156 3.782,-8.077 3.834,-8.077
  region: 6.504,-8.098 6.624,-8.159 6.723,-8.258 6.802,-8.501 6.802,-8.941 5.898,-8.941 5.898,-8.505 5.919,-8.375 5.98,-8.255 6.079,-8.156 6.322,-8.077 6.374,-8.077
B.Mask:
  region: 6.802,8.505 6.781,8.375 6.72,8.255 6.621,8.156 6.378,8.077 6.326,8.077 6.196,8.098 6.076,8.159 5.977,8.258 5.898,8.501 5.898,8.941 6.802,8.941
  region: 4.262,8.505 4.241,8.375 4.18,8.255 4.081,8.156 3.838,8.077 3.786,8.077 3.656,8.098 3.536,8.159 3.437,8.258 3.358,8.501 3.358,8.941 4.262,8.941
  region: 1.722,8.505 1.701,8.375 1.64,8.255 1.541,8.156 1.298,8.077 1.246,8.077 1.116,8.098 0.996,8.159 0.897,8.258 0.818,8.501 0.818,8.941 1.722,8.941
  region: -0.818,8.505 -0.839,8.375 -0.9,8.255 -0.999,8.156 -1.242,8.077 -1.294,8.077 -1.424,8.098 -1.544,8.159 -1.643,8.258 -1.722,8.501 -1.722,8.941 -0.818,8.941
  region: -3.358,8.505 -3.379,8.375 -3.44,8.255 -3.539,8.156 -3.782,8.077 -3.834,8.077 -3.964,8.098 -4.084,8.159 -4.183,8.258 -4.262,8.501 -4.262,8.941 -3.358,8.941
  region: -5.898,8.505 -5.919,8.375 -5.98,8.255 -6.079,8.156 -6.322,8.077 -6.374,8.077 -6.504,8.098 -6.624,8.159 -6.723,8.258 -6.802,8.501 -6.802,8.941 -5.898,8.941
  region: -6.196,-8.098 -6.076,-8.159 -5.977,-8.258 -5.898,-8.501 -5.898,-8.941 -6.802,-8.941 -6.802,-8.505 -6.781,-8.375 -6.72,-8.255 -6.621,-8.156 -6.378,-8.077 -6.326,-8.077
  region: -3.656,-8.098 -3.536,-8.159 -3.437,-8.258 -3.358,-8.501 -3.358,-8.941 -4.262,-8.941 -4.262,-8.505 -4.241,-8.375 -4.18,-8.255 -4.081,-8.156 -3.838,-8.077 -3.786,-8.077
  region: -1.116,-8.098 -0.996,-8.159 -0.897,-8.258 -0.818,-8.501 -0.818,-8.941 -1.722,-8.941 -1.722,-8.505 -1.701,-8.375 -1.64,-8.255 -1.541,-8.156 -1.298,-8.077 -1.246,-8.077
  region: 1.424,-8.098 1.544,-8.159 1.643,-8.258 1.722,-8.501 1.722,-8.941 0.818,-8.941 0.818,-8.505 0.839,-8.375 0.9,-8.255 0.999,-8.156 1.242,-8.077 1.294,-8.077
  region: 3.964,-8.098 4.084,-8.159 4.183,-8.258 4.262,-8.501 4.262,-8.941 3.358,-8.941 3.358,-8.505 3.379,-8.375 3.44,-8.255 3.539,-8.156 3.782,-8.077 3.834,-8.077
  region: 6.504,-8.098 6.624,-8.159 6.723,-8.258 6.802,-8.501 6.802,-8.941 5.898,-8.941 5.898,-8.505 5.919,-8.375 5.98,-8.255 6.079,-8.156 6.322,-8.077 6.374,-8.077
Edge.Cuts:
  lines w0.254: -10.475,-6.985 -10.475,6.985 cw(c-8.57,6.985) -8.57,8.89 8.575,8.89 cw(c8.575,6.985) 10.48,6.985 10.48,-6.985 cw(c8.575,-6.985) 8.575,-8.89 -8.57,-8.89 cw(c-8.57,-6.985) -10.475,-6.985

## XIAO-ESP32-C3-DIP [mil]
pads (28):
  round 60 hole 35: 1(300,300) 2(200,300) 3(100,300) 4(0,300) 5(-100,300) 6(-200,300) 7(-300,300) 8(-300,-300) 9(-200,-300) 10(-100,-300) 11(0,-300) 12(100,-300) 13(200,-300) 14(300,-300)
  rrect10% 60x95.75 smd: 1(300,332.87) 2(200,332.87) 3(100,332.87) 4(0,332.87) 5(-100,332.87) 6(-200,332.87) 7(-300,332.87) 8(-300,-332.87) 9(-200,-332.87) 10(-100,-332.87) 11(0,-332.87) 12(100,-332.87) 13(200,-332.87) 14(300,-332.87)
F.SilkS:
  circle w10: c368.9,309.33 r10
  circle w10: c403.54,354.33 r10
  lines w10: 415,-177.32 454.76,-177.32 ccw(c454.76,-157.64) 474.45,-157.64 474.45,157.14 ccw(c454.76,157.14) 454.77,176.82 415,176.97 ; 415,-275 415,275 ; 415,-275 415,275 ; 415,-275 cw(c340,-275) 340,-350 -335,-350 cw(c-335,-275) -410,-275 -410,275 cw(c-335,275) -335,350 340,350 cw(c340,275) 415,275
F.CrtYd:
  lines w10: -410.43,-350.39 -410.43,350.39 415.35,350.39 415.35,-350.39 -410.43,-350.39
F.Fab:
  circle w10: c369.13,309.21 r10
  lines w10: -410.43,-350.39 -410.43,350.39 415.35,350.39 415.35,-350.39 -410.43,-350.39

## XIAO-ESP32-C3-DIP-SMD [mil]
pads (36):
  round 60 hole 35: 1(300,300) 2(200,300) 3(100,300) 4(0,300) 5(-100,300) 6(-200,300) 7(-300,300) 8(-300,-300) 9(-200,-300) 10(-100,-300) 11(0,-300) 12(100,-300) 13(200,-300) 14(300,-300)
  rrect10% 60x95.75 smd: 1(300,332.87) 2(200,332.87) 3(100,332.87) 4(0,332.87) 5(-100,332.87) 6(-200,332.87) 7(-300,332.87) 8(-300,-332.87) 9(-200,-332.87) 10(-100,-332.87) 11(0,-332.87) 12(100,-332.87) 13(200,-332.87) 14(300,-332.87)
  round 66.93 smd: 15(340,50) 16(340,-50) 17(240,50) 18(240,-50) 19(140,50) 20(140,-50)
  rrect25% 43.31x98.43 smd: 21(15.2,175) 22(90.2,175)
F.SilkS:
  circle w10: c368.9,309.33 r10
  circle w10: c403.54,354.33 r10
  lines w10: 415,-177.32 454.76,-177.32 ccw(c454.76,-157.64) 474.45,-157.64 474.45,157.14 ccw(c454.76,157.14) 454.77,176.82 415,176.97 ; 415,-275 415,275 ; 415,-275 415,275 ; 415,-275 415,275 ; 415,-275 cw(c340,-275) 340,-350 -335,-350 cw(c-335,-275) -410,-275 -410,275 cw(c-335,275) -335,350 340,350 cw(c340,275) 415,275
F.CrtYd:
  lines w10: -410.43,-350.39 -410.43,350.39 415.35,350.39 415.35,-350.39 -410.43,-350.39
F.Fab:
  circle w10: c369.13,309.21 r10
  lines w10: -410.43,-350.39 -410.43,350.39 415.35,350.39 415.35,-350.39 -410.43,-350.39

## XIAO-ESP32-C3-SMD [mm]
pads (22):
  rrect25% 2.75x2 smd: 1(0.835,18.12) 2(0.835,15.58) 3(0.835,13.04) 4(0.835,10.5) 5(0.835,7.96) 6(0.835,5.42) 7(0.835,2.88) 8(17,2.88) 9(17,5.42) 10(17,7.96) 11(17,10.5) 12(17,13.04) 13(17,15.58) 14(17,18.12)
  round 1.7 smd: 15(7.62,19.132) 16(10.16,19.132) 17(7.62,16.592) 18(10.16,16.592) 19(7.62,14.052) 20(10.16,14.052)
  rrect25% 2.5x1.1 smd: 21(4.445,10.882) 22(4.445,12.787)
F.SilkS:
  circle w0.254: c-0.21,20.621 r0.254
  circle w0.254: c0.933,19.741 r0.254
  lines w0.254: 0,19.132 0,1.987 ccw(c1.905,1.987) 1.905,0.082 15.875,0.082 ccw(c15.875,1.987) 17.78,1.987 17.78,19.132 ccw(c15.875,19.132) 15.875,21.037 1.905,21.037 ; 0,19.136 cw(c1.905,19.136) 1.905,21.041 ; 4.395,21.037 4.399,22.047 cw(c4.899,22.047) 4.899,22.547 12.894,22.547 cw(c12.894,22.047) 13.394,22.047 13.394,21.037
F.CrtYd:
  lines w0.254: 0,0 0,21 17.8,21 17.8,0 0,0
F.Fab:
  circle w0.254: c0.936,19.747 r0.254
  lines w0.254: 0,0 0,21 17.8,21 17.8,0 0,0

## XIAO-ESP32-C5-DIP [mil]
pads (28):
  round 60 hole 35: 1(300,300) 2(200,300) 3(100,300) 4(0,300) 5(-100,300) 6(-200,300) 7(-300,300) 8(-300,-300) 9(-200,-300) 10(-100,-300) 11(0,-300) 12(100,-300) 13(200,-300) 14(300,-300)
  rrect10% 60x95.75 smd: 1(300,332.87) 2(200,332.87) 3(100,332.87) 4(0,332.87) 5(-100,332.87) 6(-200,332.87) 7(-300,332.87) 8(-300,-332.87) 9(-200,-332.87) 10(-100,-332.87) 11(0,-332.87) 12(100,-332.87) 13(200,-332.87) 14(300,-332.87)
F.SilkS:
  circle w10: c368.9,309.33 r10
  circle w10: c403.54,354.33 r10
  lines w10: 415,-177.32 454.76,-177.32 ccw(c454.76,-157.64) 474.45,-157.64 474.45,157.14 ccw(c454.76,157.14) 454.77,176.82 415,176.97 ; 415,-275 415,275 ; 415,-275 415,275 ; 415,-275 cw(c340,-275) 340,-350 -335,-350 cw(c-335,-275) -410,-275 -410,275 cw(c-335,275) -335,350 340,350 cw(c340,275) 415,275
F.CrtYd:
  lines w10: -410.43,-350.39 -410.43,350.39 415.35,350.39 415.35,-350.39 -410.43,-350.39
F.Fab:
  circle w10: c369.13,309.21 r10
  lines w10: -410.43,-350.39 -410.43,350.39 415.35,350.39 415.35,-350.39 -410.43,-350.39

## XIAO-ESP32-C5-SMD [mm]
pads (25):
  rrect25% 2.75x2 smd: 1(0.835,18.12) 2(0.835,15.58) 3(0.835,13.04) 4(0.835,10.5) 5(0.835,7.96) 6(0.835,5.42) 7(0.835,2.88) 8(17,2.88) 9(17,5.42) 10(17,7.96) 11(17,10.5) 12(17,13.04) 13(17,15.58) 14(17,18.12)
  round 1.7 smd: 15(7.617,19.142) 16(10.157,19.142) 17(7.617,16.602) 18(10.157,16.602) 19(7.617,14.062) 20(10.157,14.062) 21(7.617,11.522) 22(10.064,11.578)
  rrect25% 1.1x2.5 smd: 23(7.309,4.968) 24(9.849,4.968)
  rrect25% 1.9x3.1 smd: 25(9.949,8.412)
F.SilkS:
  circle w0.254: c-0.21,20.621 r0.254
  circle w0.254: c1.064,19.904 r0.254
  lines w0.254: 0,19.132 0,1.987 ccw(c1.905,1.987) 1.905,0.082 15.875,0.082 ccw(c15.875,1.987) 17.78,1.987 17.78,19.132 ccw(c15.875,19.132) 15.875,21.037 1.905,21.037 ; 0,19.136 cw(c1.905,19.136) 1.905,21.041 ; 4.595,21.037 4.599,22.047 cw(c5.099,22.047) 5.099,22.547 13.094,22.547 cw(c13.094,22.047) 13.594,22.047 13.594,21.037
F.CrtYd:
  lines w0.254: 0,0 0,21 17.8,21 17.8,0 0,0
F.Fab:
  circle w0.254: c1.084,19.9 r0.254
  lines w0.254: 0,0 0,21 17.8,21 17.8,0 0,0

## XIAO-ESP32-C6-DIP [mil]
pads (28):
  round 60 hole 35: 1(300,300) 2(200,300) 3(100,300) 4(0,300) 5(-100,300) 6(-200,300) 7(-300,300) 8(-300,-300) 9(-200,-300) 10(-100,-300) 11(0,-300) 12(100,-300) 13(200,-300) 14(300,-300)
  rrect10% 60x95.75 smd: 1(300,332.87) 2(200,332.87) 3(100,332.87) 4(0,332.87) 5(-100,332.87) 6(-200,332.87) 7(-300,332.87) 8(-300,-332.87) 9(-200,-332.87) 10(-100,-332.87) 11(0,-332.87) 12(100,-332.87) 13(200,-332.87) 14(300,-332.87)
F.SilkS:
  circle w10: c370.87,307.36 r10
  region: 374.77,316.78 378.08,314.57 380.29,311.26 381.06,307.36 380.29,303.46 378.08,300.15 374.77,297.94 370.87,297.17 366.96,297.94 363.66,300.15 361.45,303.46 360.67,307.36 361.45,311.26 363.66,314.57 366.96,316.78 370.87,317.56
  circle w10: c405.51,352.36 r10
  region: 409.41,361.78 412.72,359.57 414.93,356.26 415.71,352.36 414.93,348.46 412.72,345.15 409.41,342.94 405.51,342.17 401.61,342.94 398.3,345.15 396.09,348.46 395.32,352.36 396.09,356.26 398.3,359.57 401.61,361.78 405.51,362.56
  lines w10: 415,-177.32 454.76,-177.32 ccw(c454.76,-157.64) 474.45,-157.64 474.45,157.14 ccw(c454.76,157.14) 454.77,176.82 415,176.97 ; 415,-275 415,275 ; 415,-275 415,275 ; 415,-275 cw(c340,-275) 340,-350 -335,-350 cw(c-335,-275) -410,-275 -410,275 cw(c-335,275) -335,350 340,350 cw(c340,275) 415,275
F.CrtYd:
  lines w10: -410.43,-350.39 -410.43,350.39 415.35,350.39 415.35,-350.39 -410.43,-350.39
F.Fab:
  circle w10: c371.1,307.24 r10
  region: 375,316.66 378.31,314.45 380.52,311.15 381.3,307.24 380.52,303.34 378.31,300.03 375,297.82 371.1,297.05 367.2,297.82 363.89,300.03 361.68,303.34 360.91,307.24 361.68,311.15 363.89,314.45 367.2,316.66 371.1,317.44
  lines w10: -410.43,-350.39 -410.43,350.39 415.35,350.39 415.35,-350.39 -410.43,-350.39

## XIAO-ESP32-C6-SMD [mm]
pads (24):
  rrect25% 2.75x2 smd: 1(0.835,18.12) 2(0.835,15.58) 3(0.835,13.04) 4(0.835,10.5) 5(0.835,7.96) 6(0.835,5.42) 7(0.835,2.88) 8(17,2.88) 9(17,5.42) 10(17,7.96) 11(17,10.5) 12(17,13.04) 13(17,15.58) 14(17,18.12)
  round 1.7 smd: 15(7.617,19.142) 16(10.157,19.142) 17(7.617,16.602) 18(10.157,16.602) 19(7.617,14.062) 20(10.157,14.062) 21(7.617,11.522) 22(10.064,11.578)
  rrect25% 1.1x2.5 smd: 23(7.109,4.968) 24(9.649,4.968)
F.SilkS:
  circle w0.254: c-0.21,20.621 r0.254
  circle w0.254: c1.064,19.904 r0.254
  lines w0.254: 0,19.132 0,1.987 ccw(c1.905,1.987) 1.905,0.082 15.875,0.082 ccw(c15.875,1.987) 17.78,1.987 17.78,19.132 ccw(c15.875,19.132) 15.875,21.037 1.905,21.037 ; 0,19.136 cw(c1.905,19.136) 1.905,21.041 ; 4.395,21.037 4.399,22.047 cw(c4.899,22.047) 4.899,22.547 12.894,22.547 cw(c12.894,22.047) 13.394,22.047 13.394,21.037
F.CrtYd:
  lines w0.254: 0,0 0,21 17.8,21 17.8,0 0,0
F.Fab:
  circle w0.254: c1.084,19.9 r0.254
  lines w0.254: 0,0 0,21 17.8,21 17.8,0 0,0

## XIAO-ESP32-S3-DIP [mil]
pads (28):
  round 60 hole 35: 1(300,300) 2(200,300) 3(100,300) 4(0,300) 5(-100,300) 6(-200,300) 7(-300,300) 8(-300,-300) 9(-200,-300) 10(-100,-300) 11(0,-300) 12(100,-300) 13(200,-300) 14(300,-300)
  rrect10% 60x95.75 smd: 1(300,332.87) 2(200,332.87) 3(100,332.87) 4(0,332.87) 5(-100,332.87) 6(-200,332.87) 7(-300,332.87) 8(-300,-332.87) 9(-200,-332.87) 10(-100,-332.87) 11(0,-332.87) 12(100,-332.87) 13(200,-332.87) 14(300,-332.87)
F.SilkS:
  circle w10: c374.8,305.55 r10
  region: 378.7,314.97 382.01,312.76 384.22,309.45 385,305.55 384.22,301.65 382.01,298.34 378.7,296.13 374.8,295.36 370.9,296.13 367.59,298.34 365.38,301.65 364.61,305.55 365.38,309.45 367.59,312.76 370.9,314.97 374.8,315.75
  circle w10: c409.45,350.55 r10
  region: 413.35,359.97 416.66,357.76 418.87,354.45 419.64,350.55 418.87,346.65 416.66,343.34 413.35,341.13 409.45,340.36 405.55,341.13 402.24,343.34 400.03,346.65 399.25,350.55 400.03,354.45 402.24,357.76 405.55,359.97 409.45,360.75
  lines w10: 415,-177.32 454.76,-177.32 ccw(c454.76,-157.64) 474.45,-157.64 474.45,157.14 ccw(c454.76,157.14) 454.77,176.82 415,176.97 ; 415,-275 415,275 ; 415,-275 415,275 ; 415,-275 cw(c340,-275) 340,-350 -335,-350 cw(c-335,-275) -410,-275 -410,275 cw(c-335,275) -335,350 340,350 cw(c340,275) 415,275
F.CrtYd:
  lines w10: -410.43,-350.39 -410.43,350.39 415.35,350.39 415.35,-350.39 -410.43,-350.39
F.Fab:
  circle w10: c375.04,305.43 r10
  region: 378.94,314.85 382.25,312.64 384.46,309.33 385.24,305.43 384.46,301.53 382.25,298.22 378.94,296.01 375.04,295.24 371.14,296.01 367.83,298.22 365.62,301.53 364.84,305.43 365.62,309.33 367.83,312.64 371.14,314.85 375.04,315.63
  lines w10: -410.43,-350.39 -410.43,350.39 415.35,350.39 415.35,-350.39 -410.43,-350.39

## XIAO-ESP32-S3-Plus-SMD [mm]
pads (34):
  rrect10% 0.95x2.032 smd: 1(7.62,8.255) 2(5.08,8.255) 3(2.54,8.255) 4(0,8.255) 5(-2.54,8.255) 6(-5.08,8.255) 7(-7.62,8.255) 8(-7.62,-8.255) 9(-5.08,-8.255) 10(-2.54,-8.255) 11(0,-8.255) 12(2.54,-8.255) 13(5.08,-8.255) 14(7.62,-8.255)
  rrect10% 0.95x1.232 smd: 15(6.35,8.655) 16(3.81,8.655) 17(1.27,8.655) 18(-1.27,8.655) 19(-3.81,8.655) 20(-6.35,8.655) 21(-6.35,-8.655) 22(-3.81,-8.655) 23(-1.27,-8.655)
  round 1.7 smd: 24(8.636,1.27) 25(8.636,-1.27) 26(6.096,1.27) 27(6.096,-1.27) 28(3.556,1.27) 29(3.556,-1.27) 30(1.016,1.27) 31(1.016,-1.27)
  rrect10% 2.5x1.1 smd: 32(-5.518,0.994) 33(-5.518,-1.006)
  rrect10% 2.5x2.8 smd: 34(-1.875,-1.125)
F.SilkS:
  circle w0.254: c9.408,7.826 r0.254
  circle w0.254: c10.125,9.1 r0.254
  lines w0.254: 8.636,8.89 -8.509,8.89 ccw(c-8.509,6.985) -10.414,6.985 -10.414,-6.985 ccw(c-8.509,-6.985) -8.509,-8.89 8.636,-8.89 ccw(c8.636,-6.985) 10.541,-6.985 10.541,6.985 ; 8.64,8.89 cw(c8.64,6.985) 10.545,6.985 ; 10.541,-4.504 11.551,-4.504 ccw(c11.551,-4.004) 12.051,-4.004 12.051,3.991 ccw(c11.551,3.991) 11.551,4.491 10.541,4.495
F.CrtYd:
  lines w0.254: -10.4,-8.9 -10.4,8.9 10.55,8.9 10.55,-8.9 -10.4,-8.9
F.Fab:
  lines w0.254: -10.4,-8.9 -10.4,8.9 10.55,8.9 10.55,-8.9 -10.4,-8.9

## XIAO-ESP32-S3-SMD [mm]
pads (25):
  rrect25% 2.75x2 smd: 1(0.835,18.12) 2(0.835,15.58) 3(0.835,13.04) 4(0.835,10.5) 5(0.835,7.96) 6(0.835,5.42) 7(0.835,2.88) 8(17,2.88) 9(17,5.42) 10(17,7.96) 11(17,10.5) 12(17,13.04) 13(17,15.58) 14(17,18.12)
  round 1.7 smd: 15(7.62,19.132) 16(10.16,19.132) 17(7.62,16.592) 18(10.16,16.592) 19(7.62,14.052) 20(10.16,14.052) 21(7.62,11.512) 22(10.16,11.512)
  rrect25% 2.5x1.1 smd: 23(4.445,10.882) 24(4.445,12.787)
  rrect25% 2.75x2.5 smd: 25(10.01,8.5)
F.SilkS:
  circle w0.254: c-0.21,20.621 r0.254
  circle w0.254: c1.007,19.898 r0.254
  lines w0.254: 0,19.132 0,1.987 ccw(c1.905,1.987) 1.905,0.082 15.875,0.082 ccw(c15.875,1.987) 17.78,1.987 17.78,19.132 ccw(c15.875,19.132) 15.875,21.037 1.905,21.037 ; 0,19.136 cw(c1.905,19.136) 1.905,21.041 ; 4.395,21.037 4.399,22.047 cw(c4.899,22.047) 4.899,22.547 12.894,22.547 cw(c12.894,22.047) 13.394,22.047 13.394,21.037
F.CrtYd:
  lines w0.254: -0.003,0.074 -0.003,21.022 17.787,21.022 17.787,0.074 -0.003,0.074
F.Fab:
  circle w0.254: c0.999,19.905 r0.254
  lines w0.254: -0.005,0.071 -0.005,21.022 17.779,21.022 17.779,0.071 -0.005,0.071